# Altium integrated library TPD4E05U06DQAR.IntLib: 1 symbol
Pins are listed as number, name and electrical type; pins without a type are passive.

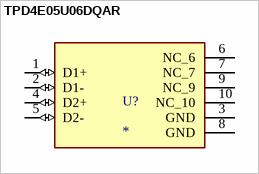
[diagram p0: symbol TPD4E05U06DQAR]

## TPD4E05U06DQAR
designator U?
Quad 0.5-pF, 5.5-V, Â±12-kV ESD protection diode for USB, HDMI & High Speed Interfaces; MF: Texas Instruments; MP: TPD4E05U06DQAR; Value: *; SnapEDA_Link: https://www.snapeda.com/parts/TPD4E05U06DQAR/Texas+Instruments/view-part/?ref=snap; Purchase-URL: https://pricing.snapeda.com/search/part/TPD4E05U06DQAR/?ref=eda; Availability: In Stock; Price: None; Package: USON-10 Texas Instruments; Check_prices: https://www.snapeda.com/parts/TPD4E05U06DQAR/Texas+Instruments/view-part/?ref=eda
footprint IC_TPD4E05U06DQAR
pins: 1 D1+ (io), 2 D1- (io), 3 GND (power), 4 D2+ (io), 5 D2- (io), 6 NC_6, 7 NC_7, 8 GND (power), 9 NC_9, 10 NC_10